# Altium footprint library mod_pwr.PcbLib: 1 footprints
Each footprint in its own frame and in the unit in brackets; x right, y up, seen from the top. Pads: shape width x height; smd on the part's side, far side on the other; paste and mask are expansions set on the pad; w line width, h text height; cw(c..) or ccw(c..) is an arc to the next point about the centre after c.
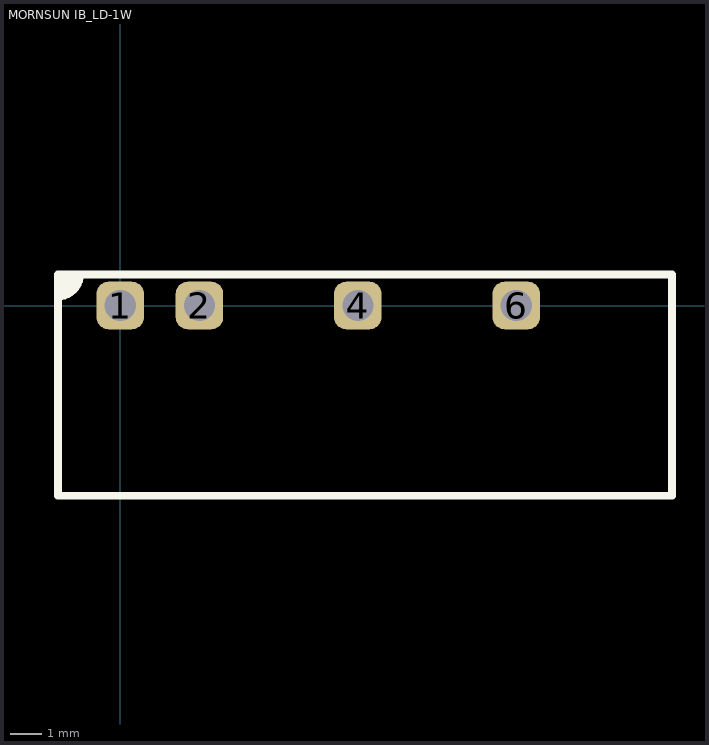
[diagram p0: the footprint, top view; thin cyan lines are the x and y axes]

## MORNSUN IB_LD-1W [mil]
pads (4):
  rrect50% 60x60 hole 39.37: 1(0,0) 2(100,0) 4(300,0) 6(500,0)
Top Overlay:
  region: -78.74,11.53 -78.74,39.37 -50.9,39.37 -50.9,36.63 -51.97,31.25 -54.07,26.18 -57.12,21.62 -60.99,17.75 -65.55,14.7 -70.62,12.6 -76,11.53
  lines w10: -78.74,39.37 -78.74,11.53 ccw(c-78.74,39.37) -50.9,39.37 -78.74,39.37 ; -78.74,39.37 696.85,39.37 696.85,35.43 696.85,-240.16 -78.74,-240.16 -78.74,-11.81 -78.74,39.37
Top Component:
  region: -78.74,11.53 -78.74,39.37 -50.9,39.37 -50.9,36.63 -51.97,31.25 -54.07,26.18 -57.12,21.62 -60.99,17.75 -65.55,14.7 -70.62,12.6 -76,11.53
  lines w2: -78.74,39.37 696.85,39.37 696.85,35.43 696.85,-240.16 -78.74,-240.16 -78.74,-11.81 -78.74,39.37 ; -78.74,39.37 -78.74,11.53 ccw(c-78.74,39.37) -50.9,39.37 -78.74,39.37
  text ".Designator" at -39.37,-141.73 h100
3D body "User Library-IB1205S-2W.step": height 393.7, standoff -98.43, extent -75,-239.99 696.65,35.99